# Altium schematic symbol library Library_Schematics.SchLib: 23 symbols
Pins are listed as number, name and electrical type; pins without a type are passive.

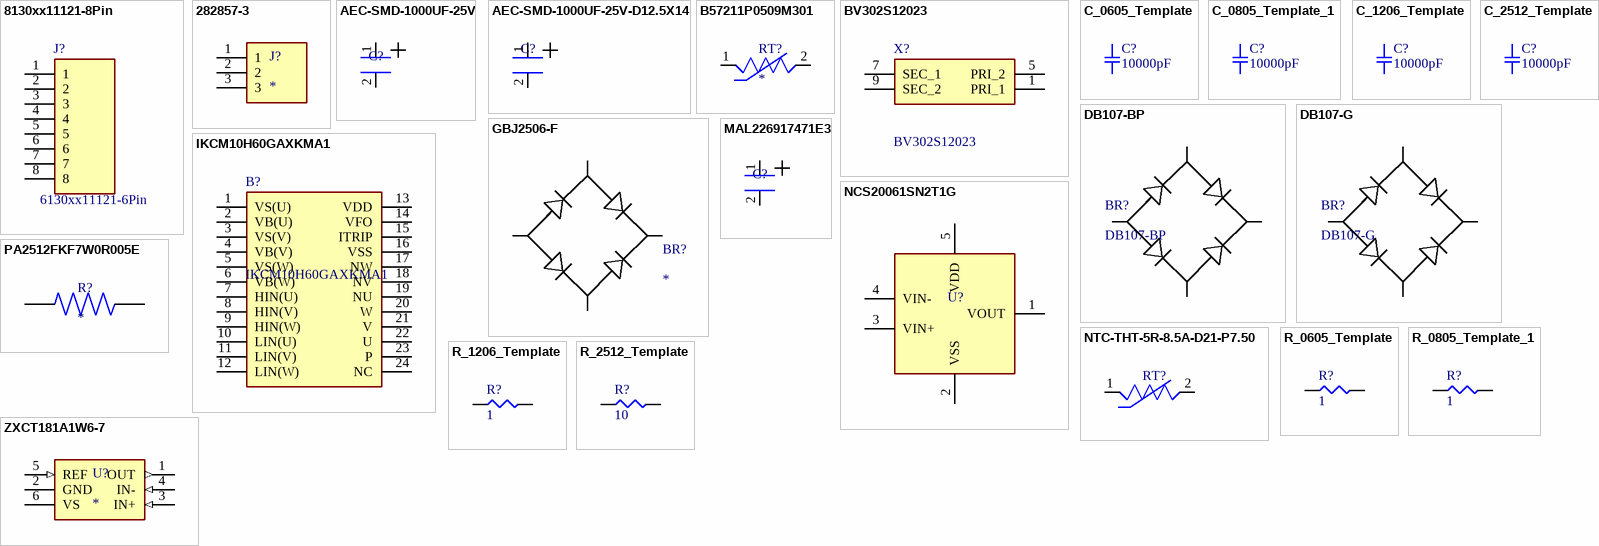
[diagram p0: symbols 8130xx11121-8Pin to ZXCT181A1W6-7]

## 8130xx11121-8Pin
designator J?, comment 6130xx11121-6Pin
2.54MM PIN HEADER; Manufacturer_Name: Wurth Elektronik; Geometry.Height: 8.69mm; Manufacturer_Part_Number: 6130xx11121-6Pin; Mouser Part Number: *; Mouser Price/Stock: *; Arrow Part Number: *; Arrow Price/Stock: *; Datasheet Link: https://www.we-online.com/katalog/datasheet/6130xx11121.pdf
footprint 200_HDRV6W64P0X254_1X6_1524X254X869P
pins: 1, 2, 3, 4, 5, 6, 7, 8

## 282857-3
designator J?
3 Position Wire to Board Terminal Block Horizontal with Board 0.200 (5.08mm) Through Hole; MF: TE Connectivity; MP: 282857-3; SnapEDA_Link: https://www.snapeda.com/parts/282857-3/TE+Connectivity+AMP+Connectors/view-part/?ref=snap; Package: None; Value: *; EU_RoHS_Compliance: Compliant with Exemptions; Check_prices: https://www.snapeda.com/parts/282857-3/TE+Connectivity+AMP+Connectors/view-part/?ref=eda
footprint 201_TE_282857-3
pins: 1, 2, 3

## AEC-SMD-1000UF-25V
designator C?
1000 µF, 25 V polarized aluminum electrolytic capacitor, SMD V-chip package, Ø10 mm body, approx. 10.5 mm height, 105 °C rated.
footprint 098_AEC-SMD-1000UF-25V
pins: 1, 2

## AEC-SMD-1000UF-25V-D12.5X14
designator C?
Polarized SMD aluminum electrolytic capacitor, 1000 µF, 25 V, Ø12.5 × 14 mm. Filters the auxiliary DC supply.
footprint 096_AEC-SMD-1000UF-25V-D12.5X14 (Polarized SMD aluminum electrolytic capacitor, 1000 µF, 25 V, Ø12.5 × 14 mm. Filters the auxiliary DC supply.)
pins: 1, 2

## B57211P0509M301
designator RT?
Inrush Current Limiter 5 Ohms Â±20% 5 A 0.512 (13.00mm); MF: EPCOS; MP: B57211P0509M301; Package: None; Price: None; Check_prices: https://www.snapeda.com/parts/B57211P0509M301/EPCOS/view-part/?ref=eda; Value: *; SnapEDA_Link: https://www.snapeda.com/parts/B57211P0509M301/EPCOS/view-part/?ref=snap; Availability: In Stock; Purchase-URL: https://pricing.snapeda.com/search?q=B57211P0509M301&ref=eda
footprint 307_THRMRB750W80L1300T600H2000
pins: 1, 2

## BV302S12023
designator X?
2.3VA Encapsulated Transformer 50/60Hz; Manufacturer_Name: Zettler Group; Geometry.Height: 29.8mm; Manufacturer_Part_Number: BV302S12023; Mouser Part Number: *; Mouser Price/Stock: *; Arrow Part Number: *; Arrow Price/Stock: *; Datasheet Link: https://www.zettlermagnetics.com/pdfs/EI30_23.pdf
footprint 899_BV302S12023
pins: 1 PRI_1, 5 PRI_2, 7 SEC_1, 9 SEC_2

## C_0605_Template
designator C?, comment 10000pF
CAP CER 0605; Part Number: GC321AD72E103KX01D; Manufacturer: Murata Electronics North America; Factory Stock: 0; Unit Price (USD): 0.3; Minimum Quantity: 1; Tolerance: ±10%; Voltage: 250V; Temperature Coefficient: X7T; Datasheets: http://search.murata.co.jp/Ceramy/image/img/A01X/G101/ENG/GC321AD72E103KX01-01.pdf; Image: //media.digikey.com/Renders/Murata%20Renders/0805(GC3)200x125.jpg; Digi-Key Part Number: 490-13986-1-ND; Quantity Available: 4000; @ qty: 0; Packaging: Cut Tape (CT); Series: GC3; Part Status: Active; Value: 10000pF; Operating Temperature: -55°C ~ 125°C; Features: -; Ratings: AEC-Q200; Applications: Automotive; Mounting Type: Surface Mount, MLCC; Package / Case: 0805 (2012 Metric); Size / Dimension: 0.079" L x 0.049" W (2.00mm x 1.25mm); Height - Seated (Max): -; Thickness (Max): 0.039" (1.00mm); Lead Spacing: -; Lead Style: -
footprint 006_SMD_0605
pins: 1, 2

## C_0805_Template_1
designator C?, comment 10000pF
CAP CER 0805; Part Number: GC321AD72E103KX01D; Manufacturer: Murata Electronics North America; Factory Stock: 0; Unit Price (USD): 0.3; Minimum Quantity: 1; Tolerance: ±10%; Voltage: 250V; Temperature Coefficient: X7T; Datasheets: http://search.murata.co.jp/Ceramy/image/img/A01X/G101/ENG/GC321AD72E103KX01-01.pdf; Image: //media.digikey.com/Renders/Murata%20Renders/0805(GC3)200x125.jpg; Digi-Key Part Number: 490-13986-1-ND; Quantity Available: 4000; @ qty: 0; Packaging: Cut Tape (CT); Series: GC3; Part Status: Active; Value: 10000pF; Operating Temperature: -55°C ~ 125°C; Features: -; Ratings: AEC-Q200; Applications: Automotive; Mounting Type: Surface Mount, MLCC; Package / Case: 0805 (2012 Metric); Size / Dimension: 0.079" L x 0.049" W (2.00mm x 1.25mm); Height - Seated (Max): -; Thickness (Max): 0.039" (1.00mm); Lead Spacing: -; Lead Style: -
footprint 000_SMD-0805
pins: 1, 2

## C_1206_Template
designator C?, comment 10000pF
CAP CER 1206; Part Number: GC321AD72E103KX01D; Manufacturer: Murata Electronics North America; Factory Stock: 0; Unit Price (USD): 0.3; Minimum Quantity: 1; Tolerance: ±10%; Voltage: 250V; Temperature Coefficient: X7T; Datasheets: http://search.murata.co.jp/Ceramy/image/img/A01X/G101/ENG/GC321AD72E103KX01-01.pdf; Image: //media.digikey.com/Renders/Murata%20Renders/0805(GC3)200x125.jpg; Digi-Key Part Number: 490-13986-1-ND; Quantity Available: 4000; @ qty: 0; Packaging: Cut Tape (CT); Series: GC3; Part Status: Active; Value: 10000pF; Operating Temperature: -55°C ~ 125°C; Features: -; Ratings: AEC-Q200; Applications: Automotive; Mounting Type: Surface Mount, MLCC; Package / Case: 0805 (2012 Metric); Size / Dimension: 0.079" L x 0.049" W (2.00mm x 1.25mm); Height - Seated (Max): -; Thickness (Max): 0.039" (1.00mm); Lead Spacing: -; Lead Style: -
footprint 001_SMD-1206
pins: 1, 2

## C_2512_Template
designator C?, comment 10000pF
CAP CER 2512; Part Number: GC321AD72E103KX01D; Manufacturer: Murata Electronics North America; Factory Stock: 0; Unit Price (USD): 0.3; Minimum Quantity: 1; Tolerance: ±10%; Voltage: 250V; Temperature Coefficient: X7T; Datasheets: http://search.murata.co.jp/Ceramy/image/img/A01X/G101/ENG/GC321AD72E103KX01-01.pdf; Image: //media.digikey.com/Renders/Murata%20Renders/0805(GC3)200x125.jpg; Digi-Key Part Number: 490-13986-1-ND; Quantity Available: 4000; @ qty: 0; Packaging: Cut Tape (CT); Series: GC3; Part Status: Active; Value: 10000pF; Operating Temperature: -55°C ~ 125°C; Features: -; Ratings: AEC-Q200; Applications: Automotive; Mounting Type: Surface Mount, MLCC; Package / Case: 0805 (2012 Metric); Size / Dimension: 0.079" L x 0.049" W (2.00mm x 1.25mm); Height - Seated (Max): -; Thickness (Max): 0.039" (1.00mm); Lead Spacing: -; Lead Style: -
footprint 002_SMD-2512
pins: 1, 2

## DB107-BP
designator BR?
Description; Manufacturer_Name: MCC; Copyright: Copyright (C) 2026 Ultra Librarian. All rights reserved.; Manufacturer_Part_Number: DB107-BP
footprint 898_DB107-BP
pins: 1, 2, 3, 4

## DB107-G
designator BR?
Single-phase bridge rectifier, 1 A, 1000 V, 4-pin through-hole DB package. Rectifies the auxiliary transformer output.; Manufacturer_Name: MCC; Manufacturer_Part_Number: DB107-BP; Copyright: Copyright (C) 2026 Ultra Librarian. All rights reserved.
footprint 895_DB107-G (Single-phase bridge rectifier, 1 A, 1000 V, 4-pin through-hole DB package. Rectifies the auxiliary transformer output.)
pins: 1, 2, 3, 4

## GBJ2506-F
designator BR?
Bridge Rectifier; Manufacturer_Name: Diodes Incorporated; Manufacturer_Part_Number: GBJ2506-F; Datasheet Link: https://www.google.co.uk/search?q=diodes+GBJ2506-F&rlz=1C1CHBF_en-GBGB756GB756&oq=diodes+GBJ2506-F&aqs=chrome..69i57j69i64.1269j0j4&sourceid=chrome&ie=UTF-8; Mouser Part Number: 621-GBJ2506-F; Mouser Price/Stock: https://www.mouser.co.uk/ProductDetail/Diodes-Incorporated/GBJ2506-F?qs=mQbszxtPdlOUVtYxZe82iQ%3D%3D; Arrow Part Number: GBJ2506-F; Arrow Price/Stock: https://www.arrow.com/en/products/gbj2506-f/diodes-incorporated.html?utm_currency=USD&region=europe
footprint 996_GBJ2506-F
pins: 1, 2, 3, 4

## IKCM10H60GAXKMA1
designator B?
Intelligent Power Module 3-Ph 600V 10A; Manufacturer_Name: Infineon; Geometry.Height: 5.6mm; Manufacturer_Part_Number: IKCM10H60GAXKMA1; Mouser Part Number: 726-IKCM10H60GAXKMA1; Mouser Price/Stock: https://www.mouser.co.uk/ProductDetail/Infineon-Technologies/IKCM10H60GAXKMA1?qs=hdSwu7a6m9Y5VjDgSjSs%2Fw%3D%3D; Arrow Part Number: IKCM10H60GAXKMA1; Arrow Price/Stock: https://www.arrow.com/en/products/ikcm10h60gaxkma1/infineon-technologies-ag; Datasheet Link: https://www.infineon.com/dgdl/Infineon-IKCM10H60GA-DS-v02_04-EN.pdf?fileId=5546d4624fb7fef2014fcb43a49a78bb
footprint 997_IKCM10H60GAXKMA1
pins: 1 VS(U), 2 VB(U), 3 VS(V), 4 VB(V), 5 VS(W), 6 VB(W), 7 HIN(U), 8 HIN(V), 9 HIN(W), 10 LIN(U), 11 LIN(V), 12 LIN(W), 13 VDD, 14 VFO, 15 ITRIP, 16 VSS, 17 NW, 18 NV, 19 NU, 20 W, 21 V, 22 U, 23 P, 24 NC

## MAL226917471E3
designator C?
470 µF, 450 V polarized aluminum electrolytic capacitor, snap-in THT, Ø35 mm body, 10 mm lead spacing, 105 °C rated.
footprint 099_MAL226917471E3
pins: 1, 2

## NCS20061SN2T1G
designator U?
Single, rail-to-rail operational amplifier used as a voltage buffer for the 1.65 V current-sense reference.
footprint 897_NCS20061SN2T1G
pins: 1 VOUT, 2 VSS, 3 VIN+, 4 VIN-, 5 VDD

## NTC-THT-5R-8.5A-D21-P7.50
designator RT?
Through-hole NTC inrush current limiter, 5 Ω at 25 °C, 8.5 A, Ø21 mm disc, 7.50 mm lead pitch. Limits the DC-link capacitor charging current at power-up.; MF: EPCOS; MP: B57211P0509M301; Package: None; Price: None; Check_prices: https://www.snapeda.com/parts/B57211P0509M301/EPCOS/view-part/?ref=eda; Value: *; SnapEDA_Link: https://www.snapeda.com/parts/B57211P0509M301/EPCOS/view-part/?ref=snap; Availability: In Stock; Purchase-URL: https://pricing.snapeda.com/search?q=B57211P0509M301&ref=eda
footprint 308_NTC-THT-5R-8.5A-D21-P7.50 (Through-hole NTC inrush current limiter, 5 Ω at 25 °C, 8.5 A, Ø21 mm disc, 7.50 mm lead pitch. Limits the DC-link capacitor charging current at power-up.)
pins: 1, 2

## PA2512FKF7W0R005E
designator R?
5 mΩ, 2 W, ±1% current-sense shunt resistor, 2512 (6332 metric) SMD package, low-resistance metal-element construction.; MF: Bourns; MP: CRF2512-FZ-R005ELF; SnapEDA_Link: https://www.snapeda.com/parts/CRF2512-FZ-R005ELF/Bourns/view-part/?ref=snap; Package: 6432 Bourns; Value: *; Check_prices: https://www.snapeda.com/parts/CRF2512-FZ-R005ELF/Bourns/view-part/?ref=eda
footprint 097_PA2512FKF7W0R005E (5 mΩ, 2 W, ±1% current-sense shunt resistor, 2512 (6332 metric) SMD package, low-resistance metal-element construction.)
pins: 1, 2

## R_0605_Template
designator R?, comment 1
RES SMD 0605; Part Number: ERJ-6BQF1R0V; Manufacturer: Panasonic Electronic Components; Factory Stock: 0; Unit Price (USD): 0.05834; @ qty: 1500; Tolerance: ±1%; Power (Watts): 0.333W, 1/3W; Temperature Coefficient: ±200ppm/°C; Datasheets: https://industrial.panasonic.com/cdbs/www-data/pdf/RDA0000/AOA0000C239.pdf; Image: //media.digikey.com/Renders/Panasonic%20Renders/ERJ-0805%20Pkg.jpg; Digi-Key Part Number: P17499CT-ND; Quantity Available: 808; Minimum Quantity: 1; Packaging: Cut Tape (CT); Series: ERJ; Part Status: Active; Value: 1; Composition: Thick Film; Features: Automotive AEC-Q200, Current Sense; Operating Temperature: -55°C ~ 125°C; Package / Case: 0805 (2012 Metric); Supplier Device Package: 0805; Size / Dimension: 0.079" L x 0.049" W (2.00mm x 1.25mm); Height - Seated (Max): 0.028" (0.70mm); Number of Terminations: 2; Failure Rate: -
footprint 006_SMD_0605
pins: 1, 2

## R_0805_Template_1
designator R?, comment 1
RES SMD 0805; Part Number: ERJ-6BQF1R0V; Manufacturer: Panasonic Electronic Components; Factory Stock: 0; Unit Price (USD): 0.05834; @ qty: 1500; Tolerance: ±1%; Power (Watts): 0.333W, 1/3W; Temperature Coefficient: ±200ppm/°C; Datasheets: https://industrial.panasonic.com/cdbs/www-data/pdf/RDA0000/AOA0000C239.pdf; Image: //media.digikey.com/Renders/Panasonic%20Renders/ERJ-0805%20Pkg.jpg; Digi-Key Part Number: P17499CT-ND; Quantity Available: 808; Minimum Quantity: 1; Packaging: Cut Tape (CT); Series: ERJ; Part Status: Active; Value: 1; Composition: Thick Film; Features: Automotive AEC-Q200, Current Sense; Operating Temperature: -55°C ~ 125°C; Package / Case: 0805 (2012 Metric); Supplier Device Package: 0805; Size / Dimension: 0.079" L x 0.049" W (2.00mm x 1.25mm); Height - Seated (Max): 0.028" (0.70mm); Number of Terminations: 2; Failure Rate: -
footprint 000_SMD-0805
pins: 1, 2

## R_1206_Template
designator R?, comment 1
RES SMD 1206; Part Number: ERJ-8BQF1R0V; Manufacturer: Panasonic Electronic Components; Factory Stock: 0; Unit Price (USD): 0.05778; @ qty: 1500; Tolerance: ±1%; Power (Watts): 0.5W, 1/2W; Temperature Coefficient: ±200ppm/°C; Datasheets: https://industrial.panasonic.com/cdbs/www-data/pdf/RDA0000/AOA0000C239.pdf; Image: //media.digikey.com/Renders/Panasonic%20Renders/ERJ-1206%20Pkg.jpg; Digi-Key Part Number: P17600CT-ND; Quantity Available: 2046; Minimum Quantity: 1; Packaging: Cut Tape (CT); Series: ERJ; Part Status: Active; Value: 1; Composition: Thick Film; Features: Automotive AEC-Q200, Current Sense; Operating Temperature: -55°C ~ 125°C; Package / Case: 1206 (3216 Metric); Supplier Device Package: 1206; Size / Dimension: 0.126" L x 0.063" W (3.20mm x 1.60mm); Height - Seated (Max): 0.028" (0.70mm); Number of Terminations: 2; Failure Rate: -
footprint 001_SMD-1206
pins: 1, 2

## R_2512_Template
designator R?, comment 10
RES SMD 2512; Part Number: ERJ-1TNF10R0U; Manufacturer: Panasonic Electronic Components; Factory Stock: 0; Unit Price (USD): 0.14799; @ qty: 1500; Minimum Quantity: 1; Tolerance: ±1%; Power (Watts): 1W; Temperature Coefficient: ±100ppm/°C; Datasheets: http://industrial.panasonic.com/www-cgi/jvcr13pz.cgi?E+PZ+3+AOA0002+ERJ1TNF10R0U+7+WW; Image: //media.digikey.com/Renders/Panasonic%20Renders/ERJ-2512%20Pkg.jpg; Digi-Key Part Number: PT10.0AFCT-ND; Quantity Available: 78055; Packaging: Cut Tape (CT); Series: ERJ; Part Status: Active; Value: 10; Composition: Thick Film; Features: Automotive AEC-Q200; Operating Temperature: -55°C ~ 155°C; Package / Case: 2512 (6432 Metric); Supplier Device Package: 2512; Size / Dimension: 0.252" L x 0.126" W (6.40mm x 3.20mm); Height - Seated (Max): 0.028" (0.70mm); Number of Terminations: 2; Failure Rate: -
footprint 002_SMD-2512
pins: 1, 2

## ZXCT181A1W6-7
designator U?
Bidirectional high-side current-sense amplifier, fixed gain 20 V/V, 2.7–5.5 V supply, up to 26 V common-mode input range, SOT-26 package.; MF: Texas Instruments; MP: INA181A1IDBVR; SnapEDA_Link: https://www.snapeda.com/parts/INA181A1IDBVR/Texas+Instruments/view-part/?ref=snap; Package: SOT-23-6 Texas Instruments; Value: *; Check_prices: https://www.snapeda.com/parts/INA181A1IDBVR/Texas+Instruments/view-part/?ref=eda
footprint 896_ZXCT181A1W6-7
pins: 1 OUT (out), 2 GND (power), 3 IN+ (in), 4 IN- (in), 5 REF (in), 6 VS (power)